# Altium footprint library FSM6JSMATR.PcbLib: 1 footprints
Each footprint in its own frame and in the unit in brackets; x right, y up, seen from the top. Pads: shape width x height; smd on the part's side, far side on the other; paste and mask are expansions set on the pad; w line width, h text height; cw(c..) or ccw(c..) is an arc to the next point about the centre after c.
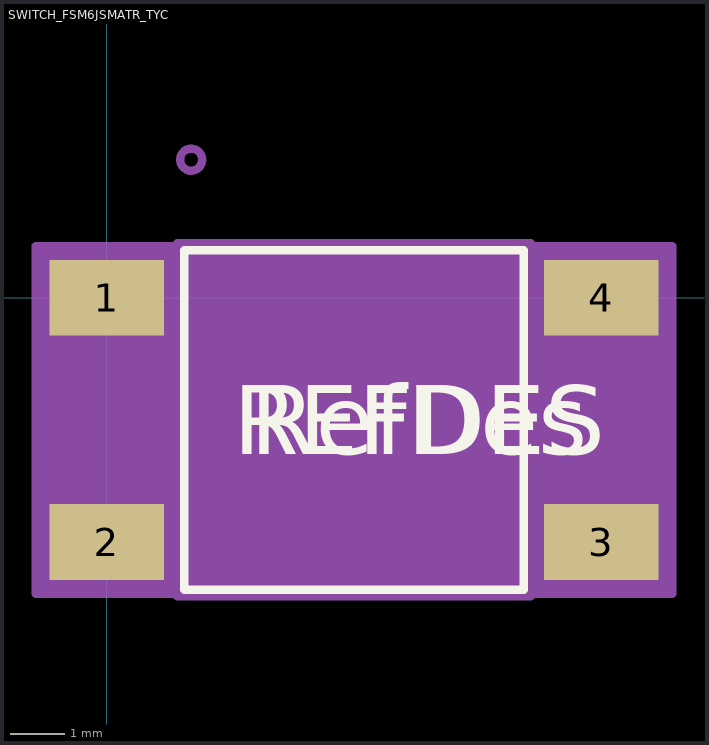
[diagram p0: the footprint, top view; thin cyan lines are the x and y axes]

## SWITCH_FSM6JSMATR_TYC [mil]
pads (4):
  rect 83x55 smd paste+0 mask+0: 1(0,0) 2(0,-177) 3(358,-177) 4(358,0)
Top Overlay:
  lines w6: 56,-211.5 302,-211.5 302,34.5 56,34.5 56,-211.5
  text "RefDes" at 104,-113.5 h50
  text "REFDES" at 91.5,-113.5 h50
Mechanical 13:
  circle w6: c61,100 r8
  circle w0: c179,-88.5 r69
  lines w1: 0,-177 61,-177 ; 0,-177 0,-177 ; 0,-177 61,-177 ; 0,0 61,0 ; 0,0 0,0 ; 0,0 61,0 ; 61,-177 61,-177 ; 61,0 61,0 ; 297,-177 297,-177 ; 297,-177 358,-177 ; 297,-177 358,-177 ; 297,0 297,0 ; 297,0 358,0 ; 297,0 358,0 ; 358,-177 358,-177 ; 358,0 358,0 ; 61,-206.5 297,-206.5 297,29.5 61,29.5 61,-206.5
  text "RefDes2" at 91.5,-113.5 h50
Mechanical 15:
  region: 51,-214.5 -51.5,-214.5 -51.5,37.5 51,37.5 51,39.5 307,39.5 307,37.5 409.5,37.5 409.5,-214.5 307,-214.5 307,-216.5 51,-216.5
  lines w6: -51.5,-214.5 -51.5,37.5 51,37.5 51,39.5 307,39.5 307,37.5 409.5,37.5 409.5,-214.5 307,-214.5 307,-216.5 51,-216.5 51,-214.5 -51.5,-214.5